# EAGLE library part LFCG-490+ (library LFCG-490+)
Signal Conditioning LTCC Low Pass Filter, DC - 490 MHz, 50O Source: Datasheet <https://www.minicircuits.com/pdfs/LFCG-490 .pdf>
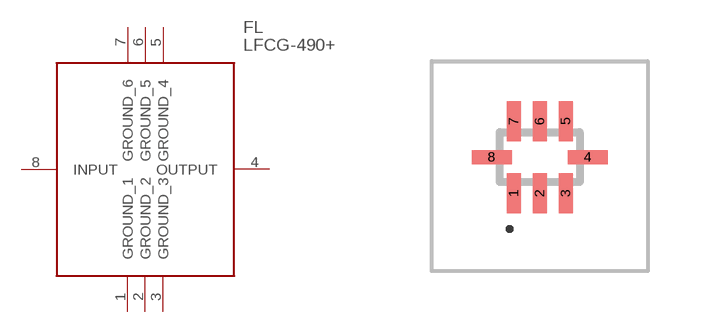
[diagram p0: symbol with the pads of LFCG490; footprint LFCG490]

Designator prefix FL

## LFCG-490+ (Description: Signal Conditioning LTCC Low Pass Filter, DC - 490 MHz, 50O; Height: 0.95mm; Manufacturer_Name: Mini-Circuits; Manufacturer_Part_Number: LFCG-490+; Mouser_Part_Number: 139-LFCG-490+; Mouser_Price-Stock: https://www.mouser.co.uk/ProductDetail/Mini-Circuits/LFCG-490%2b?qs=vmHwEFxEFR%252BNH1d71kamjA%3D%3D)  [LFCG490]
1  GROUND_1
2  GROUND_2
3  GROUND_3
4  OUTPUT
5  GROUND_4
6  GROUND_5
7  GROUND_6
8  INPUT

## Footprint LFCG490 (pad centres in mm)
LFCG-490+-2
smd 0.35 x 1: 1 -0.65,-0.9; 2 0,-0.9; 3 0.65,-0.9; 5 0.65,0.9; 6 0,0.9; 7 -0.65,0.9
smd 1 x 0.35: 4 1.2,0; 8 -1.2,0